# Altium schematic symbol library shf-110-01-l-d-sm.SchLib: 1 symbol
Pins are listed as number, name and electrical type; pins without a type are passive.

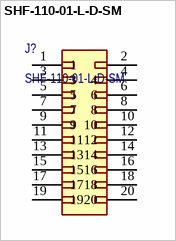
[diagram p0: symbol SHF-110-01-L-D-SM]

## SHF-110-01-L-D-SM
designator J?
Pin Header, Wire-to-Board, 1.27 mm, 2 Rows, 20 Contacts, Surface Mount, SHF Series; Manufacturer: Samtec; Manufacturer Lifecycle Status: PRODUCTION; Gender: Male; Max Current Rating: 3A; Number of Contacts: 20; Pitch: 1.27mm; Supplier: RS; Supplier Part Number: 9011876; Manufacturer Part Number: SHF-110-01-L-D-SM; RoHS: Compliant; Category: Headers and Wire Housings; Stock: 708; Contact Material: Bronze; Contact Plating: Gold; Depth: 5.59mm; Housing Color: Black; Housing Material: Polymer; Length: 19.05mm; Lifecycle Status: Production; Max Operating Temperature: 125°C; Min Operating Temperature: -55°C; Pins: 20; Number of Rows: 2; Orientation: Straight; Radiation Hardening: No; REACH SVHC: Unaffected; Termination: Solder; ComponentLink1URL: https://sigma.octopart.com:443/97277425/technical_drawing/Samtec-SHF-110-01-L-D-SM.pdf?src-supplier=Samtec; ComponentLink1Description: https://sigma.octopart.com:443/97277425/technical_drawing/Samtec-SHF-110-01-L-D-SM.pdf?src-supplier=Samtec; ComponentLink2URL: https://datasheet.octopart.com:443/SHF-110-01-L-D-SM-Samtec-datasheet-96974960.pdf?src-supplier=Samtec; ComponentLink2Description: https://datasheet.octopart.com:443/SHF-110-01-L-D-SM-Samtec-datasheet-96974960.pdf?src-supplier=Samtec; ComponentLink3URL: https://datasheet.octopart.com:443/SHF-110-01-L-D-SM-Samtec-datasheet-118492834.pdf?src-supplier=Sager+Electronics; ComponentLink3Description: https://datasheet.octopart.com:443/SHF-110-01-L-D-SM-Samtec-datasheet-118492834.pdf?src-supplier=Sager+Electronics; ComponentLink4URL: https://datasheet.octopart.com:443/SHF-110-01-L-D-SM-Samtec-datasheet-154853690.pdf?src-supplier=Sager+Electronics; ComponentLink4Description: https://datasheet.octopart.com:443/SHF-110-01-L-D-SM-Samtec-datasheet-154853690.pdf?src-supplier=Sager+Electronics; ComponentLink5URL: https://datasheet.octopart.com:443/SHF-110-01-L-D-SM-Samtec-datasheet-41643068.pdf?src-supplier=Newark; ComponentLink5Description: https://datasheet.octopart.com:443/SHF-110-01-L-D-SM-Samtec-datasheet-41643068.pdf?src-supplier=Newark; ComponentLink6URL: https://datasheet.octopart.com:443/SHF-110-01-L-D-SM-Samtec-datasheet-14716432.pdf?src-supplier=Newark; ComponentLink6Description: https://datasheet.octopart.com:443/SHF-110-01-L-D-SM-Samtec-datasheet-14716432.pdf?src-supplier=Newark; ComponentLink7URL: https://datasheet.octopart.com:443/SHF-110-01-L-D-SM-Samtec-datasheet-63880525.pdf?src-supplier=Newark; ComponentLink7Description: https://datasheet.octopart.com:443/SHF-110-01-L-D-SM-Samtec-datasheet-63880525.pdf?src-supplier=Newark; ComponentLink8URL: https://datasheet.octopart.com:443/SHF-110-01-L-D-SM-Samtec-datasheet-21214285.pdf?src-supplier=Newark; ComponentLink8Description: https://datasheet.octopart.com:443/SHF-110-01-L-D-SM-Samtec-datasheet-21214285.pdf?src-supplier=Newark; ComponentLink9URL: https://datasheet.octopart.com:443/SHF-110-01-L-D-SM-Samtec-datasheet-118892784.pdf?src-supplier=Master+Electronics; ComponentLink9Description: https://datasheet.octopart.com:443/SHF-110-01-L-D-SM-Samtec-datasheet-118892784.pdf?src-supplier=Master+Electronics; ComponentLink10URL: https://datasheet.octopart.com:443/SHF-110-01-L-D-SM-Samtec-datasheet-116534221.pdf?src-supplier=Toby+Electronics; ComponentLink10Description: https://datasheet.octopart.com:443/SHF-110-01-L-D-SM-Samtec-datasheet-116534221.pdf?src-supplier=Toby+Electronics; ComponentLink11URL: https://datasheet.octopart.com:443/SHF-110-01-L-D-SM-Samtec-datasheet-116536228.pdf?src-supplier=Toby+Electronics; ComponentLink11Description: https://datasheet.octopart.com:443/SHF-110-01-L-D-SM-Samtec-datasheet-116536228.pdf?src-supplier=Toby+Electronics; ComponentLink12URL: https://datasheet.octopart.com:443/SHF-110-01-L-D-SM-Samtec-datasheet-14716430.pdf?src-supplier=Farnell; ComponentLink12Description: https://datasheet.octopart.com:443/SHF-110-01-L-D-SM-Samtec-datasheet-14716430.pdf?src-supplier=Farnell
footprint SHF-110-01-L-D-SM
pins: 1, 2, 3, 4, 5, 6, 7, 8, 9, 10, 11, 12, 13, 14, 15, 16, 17, 18, 19, 20